# Altium footprint library ide_podule-8bit.PcbLib: 1 footprints
Each footprint in its own frame and in the unit in brackets; x right, y up, seen from the top. Pads: shape width x height; smd on the part's side, far side on the other; paste and mask are expansions set on the pad; w line width, h text height; cw(c..) or ccw(c..) is an arc to the next point about the centre after c.
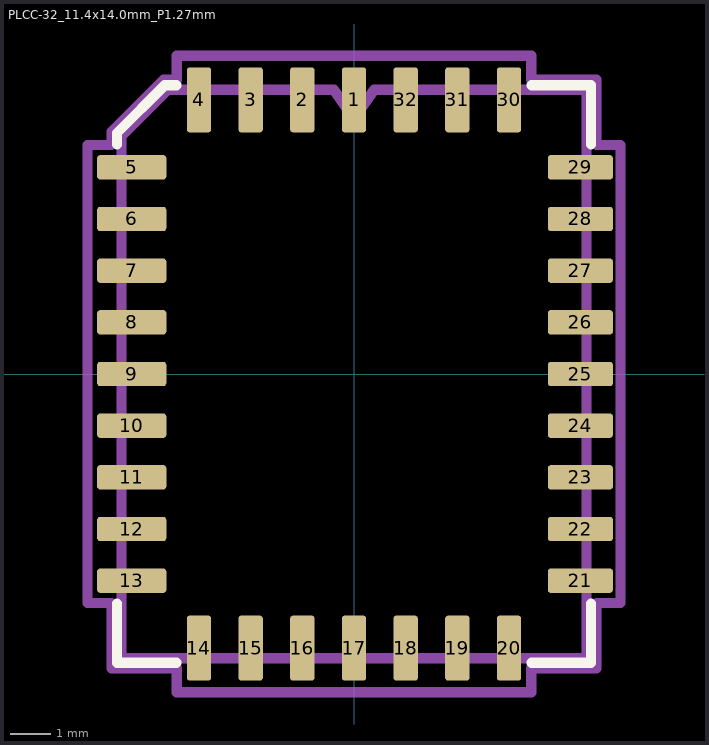
[diagram p0: the footprint, top view; thin cyan lines are the x and y axes]

## PLCC-32_11.4x14.0mm_P1.27mm [mm]
pads (32):
  rrect25% 0.6x1.6 smd mask+0.2: 1(0,6.737) 2(-1.27,6.737) 3(-2.54,6.737) 4(-3.81,6.737) 14(-3.81,-6.737) 15(-2.54,-6.737) 16(-1.27,-6.737) 17(0,-6.737) 18(1.27,-6.737) 19(2.54,-6.737) 20(3.81,-6.737) 30(3.81,6.737) 31(2.54,6.737) 32(1.27,6.737)
  rrect25% 1.7x0.6 smd mask+0.2: 5(-5.463,5.08) 6(-5.463,3.81) 7(-5.463,2.54) 8(-5.463,1.27) 9(-5.463,0) 10(-5.463,-1.27) 11(-5.463,-2.54) 12(-5.463,-3.81) 13(-5.463,-5.08)
  rrect25% 1.6x0.6 smd mask+0.2: 21(5.563,-5.08) 22(5.563,-3.81) 23(5.563,-2.54) 24(5.563,-1.27) 25(5.563,0) 26(5.563,1.27) 27(5.563,2.54) 28(5.563,3.81) 29(5.563,5.08)
Top Overlay:
  lines w0.254: -5.825,-5.64 -5.825,-7.095 -4.37,-7.095 ; -5.825,5.64 -5.825,5.923 -4.653,7.095 -4.37,7.095 ; 4.37,-7.095 5.825,-7.095 5.825,-5.64 ; 4.37,7.095 5.825,7.095 5.825,5.64
Board Shape:
  lines w0.254: -6.55,-5.63 -6.55,0 -6.55,5.63 -5.96,5.63 -5.96,5.95 -4.68,7.23 -4.36,7.23 -4.36,7.82 0,7.82 4.36,7.82 4.36,7.23 5.96,7.23 5.96,5.63 6.55,5.63 6.55,0 6.55,-5.63 5.96,-5.63 5.96,-7.23 4.36,-7.23 4.36,-7.82 0,-7.82 -4.36,-7.82 -4.36,-7.23 -5.96,-7.23 -5.96,-5.63 -6.55,-5.63
Top Courtyard:
  lines w0.254: -5.715,-6.985 -5.715,5.845 -4.575,6.985 -0.5,6.985 0,6.278 0.5,6.985 5.715,6.985 5.715,-6.985 -5.715,-6.985
  text "'.Designator'" at 3.755,3.675 h1